# Altium footprint library WR-TBL_Pluggable Connector_5.08mm.PcbLib: 295 footprints (part 11 of 19)
Each footprint in its own frame and in the unit in brackets; x right, y up, seen from the top. Pads: shape width x height; smd on the part's side, far side on the other; paste and mask are expansions set on the pad; w line width, h text height; cw(c..) or ccw(c..) is an arc to the next point about the centre after c.
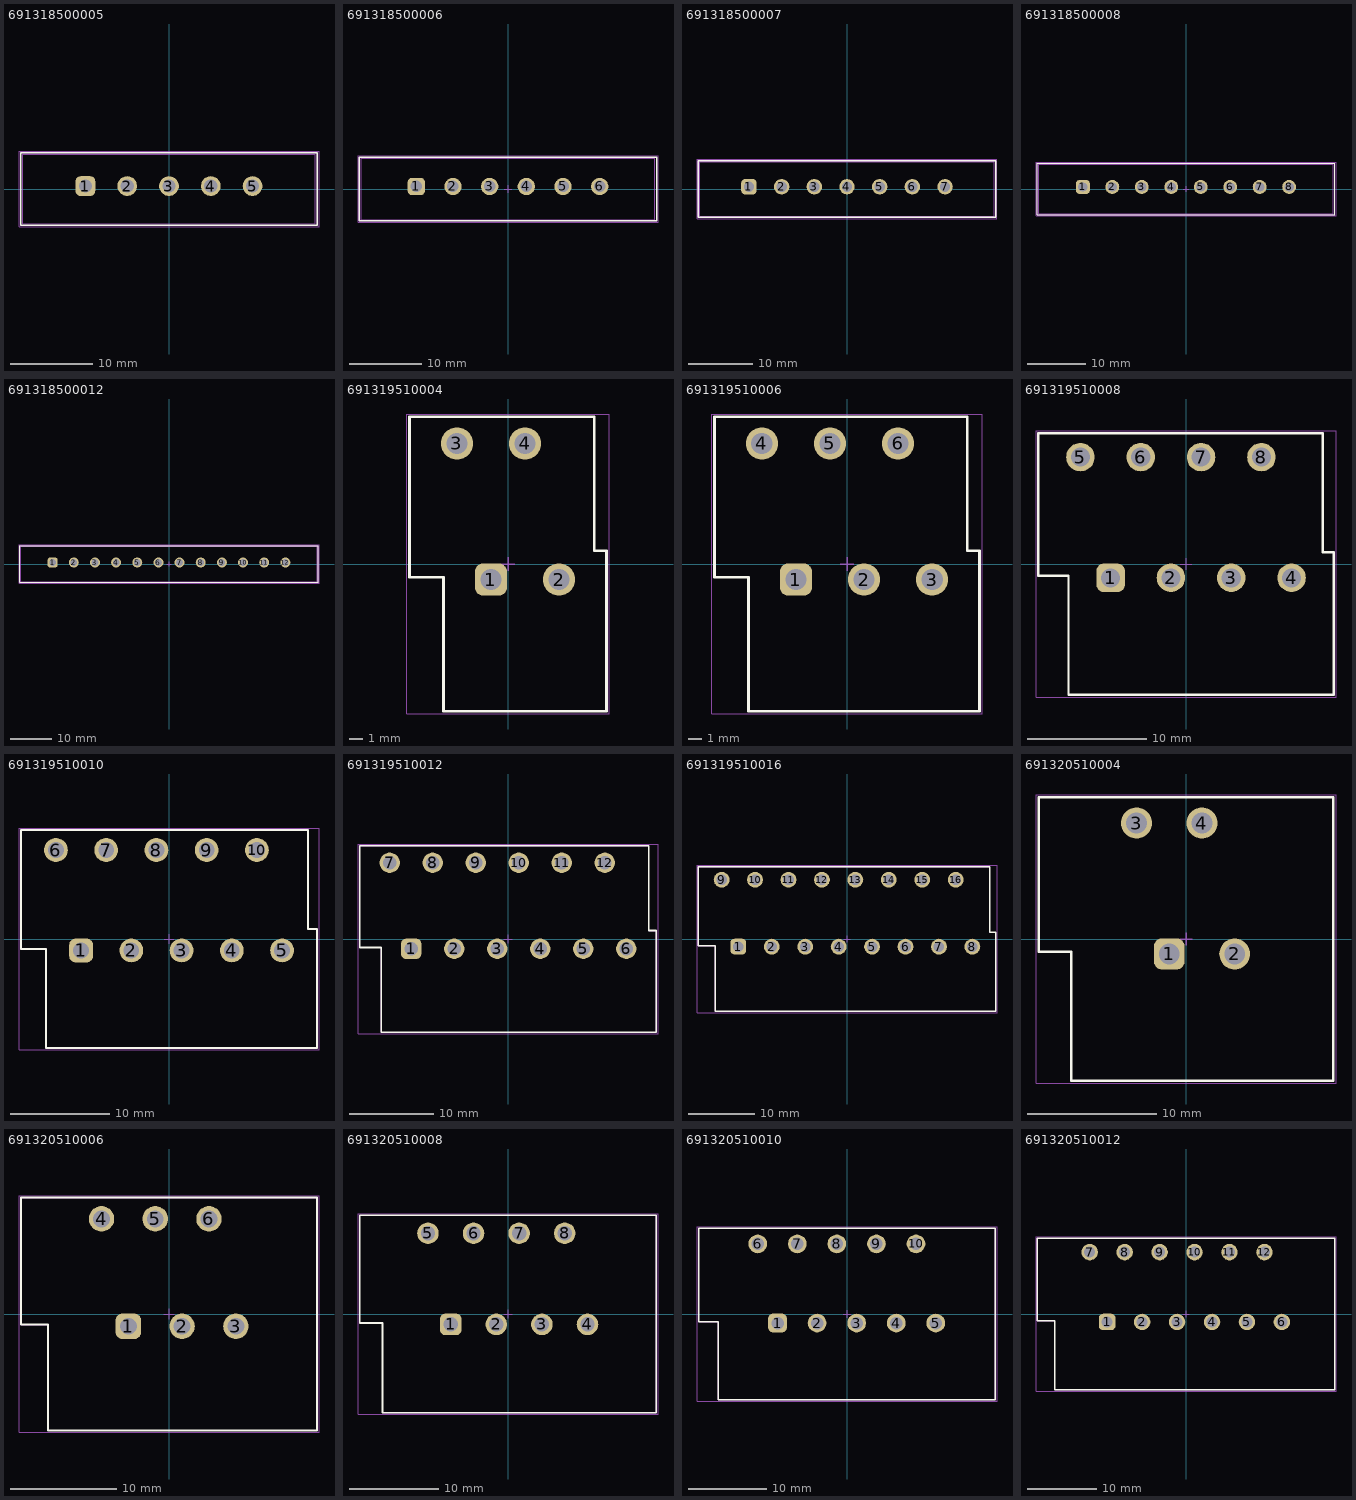
[diagram p10: the footprints below, top view; thin cyan lines are the x and y axes]

## 691318500005 [mm] "5,08mm - Closed Vertical PCB Header with Flanges - 05p"
height 12
pads (5):
  rrect50% 2.4x2.4 hole 1.6: 1(-10.16,0.35)
  round 2.4 hole 1.6: 2(-5.08,0.35) 3(0,0.35) 4(5.08,0.35) 5(10.16,0.35)
Top Overlay:
  lines w0.2: -18.03,-4.4 18.03,-4.4 18.03,4.4 -18.03,4.4 -18.03,-4.4
Top Assembly:
  lines w0.1: -18.03,-4.4 -18.03,4.4 18.03,4.4 18.03,-4.4 -18.03,-4.4
Top Designator:
  text ".Designator" at -3.647,-0.357 h1
Top 3D Body:
  lines w0.1: -17.78,-4.25 17.78,-4.25 17.78,4.25 -17.78,4.25 -17.78,-4.25
Top Courtyard:
  lines w0.05: -18.23,-4.6 18.23,-4.6 18.23,4.6 -18.23,4.6 -18.23,-4.6
Top Component Center:
  lines w0.1: -0.5,0 0.5,0 ; 0,-0.5 0,0.5
3D body "691318500005.stp": height 12.06, standoff -3.95, extent -17.78,-4.25 17.78,4.25

## 691318500006 [mm] "5,08mm - Closed Vertical PCB Header with Flanges - 06p"
height 12
pads (6):
  rrect50% 2.4x2.4 hole 1.6: 1(-12.7,0.35)
  round 2.4 hole 1.6: 2(-7.62,0.35) 3(-2.54,0.35) 4(2.54,0.35) 5(7.62,0.35) 6(12.7,0.35)
Top Overlay:
  lines w0.2: -20.57,-4.4 20.57,-4.4 20.57,4.4 -20.57,4.4 -20.57,-4.4
Top Assembly:
  lines w0.1: -20.57,-4.4 -20.57,4.4 20.57,4.4 20.57,-4.4 -20.57,-4.4
Top Designator:
  text ".Designator" at -3.647,-0.357 h1
Top 3D Body:
  lines w0.1: -20.32,-4.25 20.32,-4.25 20.32,4.25 -20.32,4.25 -20.32,-4.25
Top Courtyard:
  lines w0.05: -20.77,-4.6 20.77,-4.6 20.77,4.6 -20.77,4.6 -20.77,-4.6
Top Component Center:
  lines w0.1: -0.5,0 0.5,0 ; 0,-0.5 0,0.5
3D body "691318500006.stp": height 12.06, standoff -3.95, extent -20.32,-4.25 20.32,4.25

## 691318500007 [mm] "5,08mm - Closed Vertical PCB Header with Flanges - 07p"
height 12
pads (7):
  rrect50% 2.4x2.4 hole 1.6: 1(-15.24,0.35)
  round 2.4 hole 1.6: 2(-10.16,0.35) 3(-5.08,0.35) 4(0,0.35) 5(5.08,0.35) 6(10.16,0.35) 7(15.24,0.35)
Top Overlay:
  lines w0.2: -23.11,-4.4 23.11,-4.4 23.11,4.4 -23.11,4.4 -23.11,-4.4
Top Assembly:
  lines w0.1: -23.11,-4.4 -23.11,4.4 23.11,4.4 23.11,-4.4 -23.11,-4.4
Top Designator:
  text ".Designator" at -3.647,-0.357 h1
Top 3D Body:
  lines w0.1: -22.86,-4.25 22.86,-4.25 22.86,4.25 -22.86,4.25 -22.86,-4.25
Top Courtyard:
  lines w0.05: -23.31,-4.6 23.31,-4.6 23.31,4.6 -23.31,4.6 -23.31,-4.6
Top Component Center:
  lines w0.1: -0.5,0 0.5,0 ; 0,-0.5 0,0.5
3D body "691318500007.stp": height 12.06, standoff -3.95, extent -22.86,-4.25 22.86,4.25

## 691318500008 [mm] "5,08mm - Closed Vertical PCB Header with Flanges - 08p"
height 12
pads (8):
  rrect50% 2.4x2.4 hole 1.6: 1(-17.78,0.35)
  round 2.4 hole 1.6: 2(-12.7,0.35) 3(-7.62,0.35) 4(-2.54,0.35) 5(2.54,0.35) 6(7.62,0.35) 7(12.7,0.35) 8(17.78,0.35)
Top Overlay:
  lines w0.2: -25.65,-4.4 25.65,-4.4 25.65,4.4 -25.65,4.4 -25.65,-4.4
Top Assembly:
  lines w0.1: -25.65,-4.4 -25.65,4.4 25.65,4.4 25.65,-4.4 -25.65,-4.4
Top Designator:
  text ".Designator" at -3.647,-0.357 h1
Top 3D Body:
  lines w0.1: -25.4,-4.25 25.4,-4.25 25.4,4.25 -25.4,4.25 -25.4,-4.25
Top Courtyard:
  lines w0.05: -25.85,-4.6 25.85,-4.6 25.85,4.6 -25.85,4.6 -25.85,-4.6
Top Component Center:
  lines w0.1: -0.5,0 0.5,0 ; 0,-0.5 0,0.5
3D body "691318500008.stp": height 12.06, standoff -3.95, extent -25.4,-4.25 25.4,4.25

## 691318500012 [mm] "5,08mm - Closed Vertical PCB Header with Flanges - 12p"
height 12
pads (12):
  rrect50% 2.4x2.4 hole 1.6: 1(-27.94,0.35)
  round 2.4 hole 1.6: 2(-22.86,0.35) 3(-17.78,0.35) 4(-12.7,0.35) 5(-7.62,0.35) 6(-2.54,0.35) 7(2.54,0.35) 8(7.62,0.35) 9(12.7,0.35) 10(17.78,0.35) 11(22.86,0.35) 12(27.94,0.35)
Top Overlay:
  lines w0.2: -35.81,-4.4 35.81,-4.4 35.81,4.4 -35.81,4.4 -35.81,-4.4
Top Assembly:
  lines w0.1: -35.81,-4.4 -35.81,4.4 35.81,4.4 35.81,-4.4 -35.81,-4.4
Top Designator:
  text ".Designator" at -3.647,-0.357 h1
Top 3D Body:
  lines w0.1: -35.56,-4.25 35.56,-4.25 35.56,4.25 -35.56,4.25 -35.56,-4.25
Top Courtyard:
  lines w0.05: -36.01,-4.6 36.01,-4.6 36.01,4.6 -36.01,4.6 -36.01,-4.6
Top Component Center:
  lines w0.1: -0.5,0 0.5,0 ; 0,-0.5 0,0.5
3D body "691318500012.stp": height 12.06, standoff -3.95, extent -35.56,-4.25 35.56,4.25

## 691319510004 [mm] "Double Level Horizontal Male PCB Header with closed Flanges, pitch 5.08mm, 04p"
height 23.7
pads (4):
  rrect50% 2.4x2.4 hole 1.6: 1(-1.27,-1.16)
  round 2.4 hole 1.6: 2(3.81,-1.16) 3(-3.81,9) 4(1.27,9)
Top Overlay:
  lines w0.2: -7.35,-1 -4.81,-1 -4.81,-11 7.35,-11 7.35,1 6.45,1 6.45,11 -7.35,11 -7.35,-1
Top Assembly:
  lines w0.1: -7.35,-1 -7.35,11 6.45,11 6.45,1 7.35,1 7.35,-11 -4.81,-11 -4.81,-1 -7.35,-1
Top Designator:
  text ".Designator" at -3.647,-0.357 h1
Top 3D Body:
  lines w0.1: -7.35,-1 -4.81,-1 -4.81,-11 7.35,-11 7.35,1 6.45,1 6.45,11 -7.35,11 -7.35,-1
Top Courtyard:
  lines w0.05: -7.55,-11.2 -7.55,11.2 7.55,11.2 7.55,-11.2 -7.55,-11.2
Top Component Center:
  lines w0.1: -0.5,0 0.5,0 ; 0,-0.5 0,0.5
3D body "691319510004.stp": height 23.75, standoff -3.95, extent -7.35,-11 7.35,11

## 691319510006 [mm] "Double Level Horizontal Male PCB Header with closed Flanges, pitch 5.08mm, 06p"
height 23.7
pads (6):
  rrect50% 2.4x2.4 hole 1.6: 1(-3.81,-1.16)
  round 2.4 hole 1.6: 2(1.27,-1.16) 3(6.35,-1.16) 4(-6.35,9) 5(-1.27,9) 6(3.81,9)
Top Overlay:
  lines w0.2: -9.89,-1 -9.89,11 8.99,11 8.99,1 9.89,1 9.89,-11 -7.35,-11 -7.35,-1 -9.89,-1
Top Assembly:
  lines w0.1: -9.89,-1 -7.35,-1 -7.35,-11 9.89,-11 9.89,1 8.99,1 8.99,11 -9.89,11 -9.89,-1
Top Designator:
  text ".Designator" at -3.647,-0.357 h1
Top 3D Body:
  lines w0.1: -9.89,-1 -9.89,11 8.99,11 8.99,1 9.89,1 9.89,-11 -7.35,-11 -7.35,-1 -9.89,-1
Top Courtyard:
  lines w0.05: -10.09,-11.2 10.09,-11.2 10.09,11.2 -10.09,11.2 -10.09,-11.2
Top Component Center:
  lines w0.1: -0.5,0 0.5,0 ; 0,-0.5 0,0.5
3D body "691319510006.stp": height 23.75, standoff -3.95, extent -9.89,-11 9.89,11

## 691319510008 [mm] "Double Level Horizontal Male PCB Header with closed Flanges, pitch 5.08mm, 08p"
height 23.7
pads (8):
  rrect50% 2.4x2.4 hole 1.6: 1(-6.35,-1.16)
  round 2.4 hole 1.6: 2(-1.27,-1.16) 3(3.81,-1.16) 4(8.89,-1.16) 5(-8.89,9) 6(-3.81,9) 7(1.27,9) 8(6.35,9)
Top Overlay:
  lines w0.2: -12.43,-1 -9.89,-1 -9.89,-11 12.43,-11 12.43,1 11.53,1 11.53,11 -12.43,11 -12.43,-1
Top Assembly:
  lines w0.1: -12.43,-1 -12.43,11 11.53,11 11.53,1 12.43,1 12.43,-11 -9.89,-11 -9.89,-1 -12.43,-1
Top Designator:
  text ".Designator" at -3.647,-0.357 h1
Top 3D Body:
  lines w0.1: -12.43,-1 -9.89,-1 -9.89,-11 12.43,-11 12.43,1 11.53,1 11.53,11 -12.43,11 -12.43,-1
Top Courtyard:
  lines w0.05: -12.63,-11.2 -12.63,11.2 12.63,11.2 12.63,-11.2 -12.63,-11.2
Top Component Center:
  lines w0.1: -0.5,0 0.5,0 ; 0,-0.5 0,0.5
3D body "691319510008.stp": height 23.75, standoff -3.95, extent -12.43,-11 12.43,11

## 691319510010 [mm] "Double Level Horizontal Male PCB Header with closed Flanges, pitch 5.08mm, 10p"
height 23.7
pads (10):
  rrect50% 2.4x2.4 hole 1.6: 1(-8.89,-1.16)
  round 2.4 hole 1.6: 2(-3.81,-1.16) 3(1.27,-1.16) 4(6.35,-1.16) 5(11.43,-1.16) 6(-11.43,9) 7(-6.35,9) 8(-1.27,9) 9(3.81,9) 10(8.89,9)
Top Overlay:
  lines w0.2: -14.97,-1 -12.43,-1 -12.43,-11 14.97,-11 14.97,1 14.07,1 14.07,11 -14.97,11 -14.97,-1
Top Assembly:
  lines w0.1: -14.97,-1 -14.97,11 14.07,11 14.07,1 14.97,1 14.97,-11 -12.43,-11 -12.43,-1 -14.97,-1
Top Designator:
  text ".Designator" at -3.647,-0.357 h1
Top 3D Body:
  lines w0.1: -14.97,-1 -12.43,-1 -12.43,-11 14.97,-11 14.97,1 14.07,1 14.07,11 -14.97,11 -14.97,-1
Top Courtyard:
  lines w0.05: -15.17,-11.2 -15.17,11.2 15.17,11.2 15.17,-11.2 -15.17,-11.2
Top Component Center:
  lines w0.1: -0.5,0 0.5,0 ; 0,-0.5 0,0.5
3D body "691319510010.stp": height 23.75, standoff -3.95, extent -14.97,-11 14.97,11

## 691319510012 [mm] "Double Level Horizontal Male PCB Header with closed Flanges, pitch 5.08mm, 12p"
height 23.7
pads (12):
  rrect50% 2.4x2.4 hole 1.6: 1(-11.43,-1.16)
  round 2.4 hole 1.6: 2(-6.35,-1.16) 3(-1.27,-1.16) 4(3.81,-1.16) 5(8.89,-1.16) 6(13.97,-1.16) 7(-13.97,9) 8(-8.89,9) 9(-3.81,9) 10(1.27,9) 11(6.35,9) 12(11.43,9)
Top Overlay:
  lines w0.2: -17.51,-1 -17.51,11 16.61,11 16.61,1 17.51,1 17.51,-11 -14.97,-11 -14.97,-1 -17.51,-1
Top Assembly:
  lines w0.1: -17.51,-1 -14.97,-1 -14.97,-11 17.51,-11 17.51,1 16.61,1 16.61,11 -17.51,11 -17.51,-1
Top Designator:
  text ".Designator" at -3.647,-0.357 h1
Top 3D Body:
  lines w0.1: -17.51,-1 -17.51,11 16.61,11 16.61,1 17.51,1 17.51,-11 -14.97,-11 -14.97,-1 -17.51,-1
Top Courtyard:
  lines w0.05: -17.71,-11.2 17.71,-11.2 17.71,11.2 -17.71,11.2 -17.71,-11.2
Top Component Center:
  lines w0.1: -0.5,0 0.5,0 ; 0,-0.5 0,0.5
3D body "691319510012.stp": height 23.75, standoff -3.95, extent -17.51,-11 17.51,11

## 691319510016 [mm] "Double Level Horizontal Male PCB Header with closed Flanges, pitch 5.08mm, 16p"
height 23.7
pads (16):
  rrect50% 2.4x2.4 hole 1.6: 1(-16.51,-1.16)
  round 2.4 hole 1.6: 2(-11.43,-1.16) 3(-6.35,-1.16) 4(-1.27,-1.16) 5(3.81,-1.16) 6(8.89,-1.16) 7(13.97,-1.16) 8(19.05,-1.16) 9(-19.05,9) 10(-13.97,9) 11(-8.89,9) 12(-3.81,9) 13(1.27,9) 14(6.35,9) 15(11.43,9) 16(16.51,9)
Top Overlay:
  lines w0.2: -22.59,-1 -22.59,11 21.69,11 21.69,1 22.59,1 22.59,-11 -20.05,-11 -20.05,-1 -22.59,-1
Top Assembly:
  lines w0.1: -22.59,-1 -20.05,-1 -20.05,-11 22.59,-11 22.59,1 21.69,1 21.69,11 -22.59,11 -22.59,-1
Top Designator:
  text ".Designator" at -3.647,-0.357 h1
Top 3D Body:
  lines w0.1: -22.59,-1 -22.59,11 21.69,11 21.69,1 22.59,1 22.59,-11 -20.05,-11 -20.05,-1 -22.59,-1
Top Courtyard:
  lines w0.05: -22.79,-11.2 22.79,-11.2 22.79,11.2 -22.79,11.2 -22.79,-11.2
Top Component Center:
  lines w0.1: -0.5,0 0.5,0 ; 0,-0.5 0,0.5
3D body "691319510016.stp": height 23.75, standoff -3.95, extent -22.59,-11 22.59,11

## 691320510004 [mm] "Double Level Horizontal Male PCB Header with closed Flanges & Nut Type, pitch 5.08mm, 04p"
height 23.7
pads (4):
  rrect50% 2.4x2.4 hole 1.6: 1(-1.3,-1.16)
  round 2.4 hole 1.6: 2(3.78,-1.16) 3(-3.84,9) 4(1.24,9)
Top Overlay:
  lines w0.2: -11.44,-1 -11.44,11 11.44,11 11.44,-11 -8.9,-11 -8.9,-1 -11.44,-1
Top Assembly:
  lines w0.1: -11.44,-1 -8.9,-1 -8.9,-11 11.44,-11 11.44,11 -11.44,11 -11.44,-1
Top Designator:
  text ".Designator" at -3.647,-0.357 h1
Top 3D Body:
  lines w0.1: -11.44,-1 -11.44,11 11.44,11 11.44,-11 -8.9,-11 -8.9,-1 -11.44,-1
Top Courtyard:
  lines w0.05: -11.64,-11.2 -11.64,11.2 11.64,11.2 11.64,-11.2 -11.64,-11.2
Top Component Center:
  lines w0.1: -0.5,0 0.5,0 ; 0,-0.5 0,0.5
3D body "691320510004.stp": height 23.74, standoff -3.96, extent -11.46,-11 11.4,11

## 691320510006 [mm] "Double Level Horizontal Male PCB Header with closed Flanges & Nut Type, pitch 5.08mm, 06p"
height 23.7
pads (6):
  rrect50% 2.4x2.4 hole 1.6: 1(-3.84,-1.16)
  round 2.4 hole 1.6: 2(1.24,-1.16) 3(6.32,-1.16) 4(-6.38,9) 5(-1.3,9) 6(3.78,9)
Top Overlay:
  lines w0.2: -13.98,-1 -11.44,-1 -11.44,-11 13.98,-11 13.98,11 -13.98,11 -13.98,-1
Top Assembly:
  lines w0.1: -13.98,-1 -13.98,11 13.98,11 13.98,-11 -11.44,-11 -11.44,-1 -13.98,-1
Top Designator:
  text ".Designator" at -3.647,-0.357 h1
Top 3D Body:
  lines w0.1: -13.98,-1 -11.44,-1 -11.44,-11 13.98,-11 13.98,11 -13.98,11 -13.98,-1
Top Courtyard:
  lines w0.05: -14.18,-11.2 14.18,-11.2 14.18,11.2 -14.18,11.2 -14.18,-11.2
Top Component Center:
  lines w0.1: -0.5,0 0.5,0 ; 0,-0.5 0,0.5
3D body "691320510006.stp": height 23.74, standoff -3.96, extent -13.97,-11 13.97,11

## 691320510008 [mm] "Double Level Horizontal Male PCB Header with closed Flanges & Nut Type, pitch 5.08mm, 08p"
height 23.7
pads (8):
  rrect50% 2.4x2.4 hole 1.6: 1(-6.38,-1.16)
  round 2.4 hole 1.6: 2(-1.3,-1.16) 3(3.78,-1.16) 4(8.86,-1.16) 5(-8.92,9) 6(-3.84,9) 7(1.24,9) 8(6.32,9)
Top Overlay:
  lines w0.2: -16.52,-1 -13.98,-1 -13.98,-11 16.52,-11 16.52,11 -16.52,11 -16.52,-1
Top Assembly:
  lines w0.1: -16.52,-1 -16.52,11 16.52,11 16.52,-11 -13.98,-11 -13.98,-1 -16.52,-1
Top Designator:
  text ".Designator" at -3.647,-0.357 h1
Top 3D Body:
  lines w0.1: -16.52,-1 -13.98,-1 -13.98,-11 16.52,-11 16.52,11 -16.52,11 -16.52,-1
Top Courtyard:
  lines w0.05: -16.72,-11.2 16.72,-11.2 16.72,11.2 -16.72,11.2 -16.72,-11.2
Top Component Center:
  lines w0.1: -0.5,0 0.5,0 ; 0,-0.5 0,0.5
3D body "691320510008.stp": height 23.74, standoff -3.96, extent -16.51,-11 16.51,11

## 691320510010 [mm] "Double Level Horizontal Male PCB Header with closed Flanges & Nut Type, pitch 5.08mm, 10p"
height 23.7
pads (10):
  rrect50% 2.4x2.4 hole 1.6: 1(-8.92,-1.16)
  round 2.4 hole 1.6: 2(-3.84,-1.16) 3(1.24,-1.16) 4(6.32,-1.16) 5(11.4,-1.16) 6(-11.46,9) 7(-6.38,9) 8(-1.3,9) 9(3.78,9) 10(8.86,9)
Top Overlay:
  lines w0.2: -19.06,-1 -16.52,-1 -16.52,-11 19.06,-11 19.06,11 -19.06,11 -19.06,-1
Top Assembly:
  lines w0.1: -19.06,-1 -19.06,11 19.06,11 19.06,-11 -16.52,-11 -16.52,-1 -19.06,-1
Top Designator:
  text ".Designator" at -3.647,-0.357 h1
Top 3D Body:
  lines w0.1: -19.06,-1 -16.52,-1 -16.52,-11 19.06,-11 19.06,11 -19.06,11 -19.06,-1
Top Courtyard:
  lines w0.05: -19.26,-11.2 19.26,-11.2 19.26,11.2 -19.26,11.2 -19.26,-11.2
Top Component Center:
  lines w0.1: -0.5,0 0.5,0 ; 0,-0.5 0,0.5
3D body "691320510010.stp": height 23.74, standoff -3.96, extent -19.05,-11 19.05,11

## 691320510012 [mm] "Double Level Horizontal Male PCB Header with closed Flanges & Nut Type, pitch 5.08mm, 12p"
height 23.7
pads (12):
  rrect50% 2.4x2.4 hole 1.6: 1(-11.46,-1.16)
  round 2.4 hole 1.6: 2(-6.38,-1.16) 3(-1.3,-1.16) 4(3.78,-1.16) 5(8.86,-1.16) 6(13.94,-1.16) 7(-14,9) 8(-8.92,9) 9(-3.84,9) 10(1.24,9) 11(6.32,9) 12(11.4,9)
Top Overlay:
  lines w0.2: -21.6,-1 -19.06,-1 -19.06,-11 21.6,-11 21.6,11 -21.6,11 -21.6,-1
Top Assembly:
  lines w0.1: -21.6,-1 -21.6,11 21.6,11 21.6,-11 -19.06,-11 -19.06,-1 -21.6,-1
Top Designator:
  text ".Designator" at -3.647,-0.357 h1
Top 3D Body:
  lines w0.1: -21.6,-1 -19.06,-1 -19.06,-11 21.6,-11 21.6,11 -21.6,11 -21.6,-1
Top Courtyard:
  lines w0.05: -21.8,-11.2 21.8,-11.2 21.8,11.2 -21.8,11.2 -21.8,-11.2
Top Component Center:
  lines w0.1: -0.5,0 0.5,0 ; 0,-0.5 0,0.5
3D body "691320510012.stp": height 23.74, standoff -3.96, extent -21.59,-11 21.59,11